# Altium footprint library PM254-1-10-Z-8.5.PcbLib: 1 footprints
Each footprint in its own frame and in the unit in brackets; x right, y up, seen from the top. Pads: shape width x height; smd on the part's side, far side on the other; paste and mask are expansions set on the pad; w line width, h text height; cw(c..) or ccw(c..) is an arc to the next point about the centre after c.
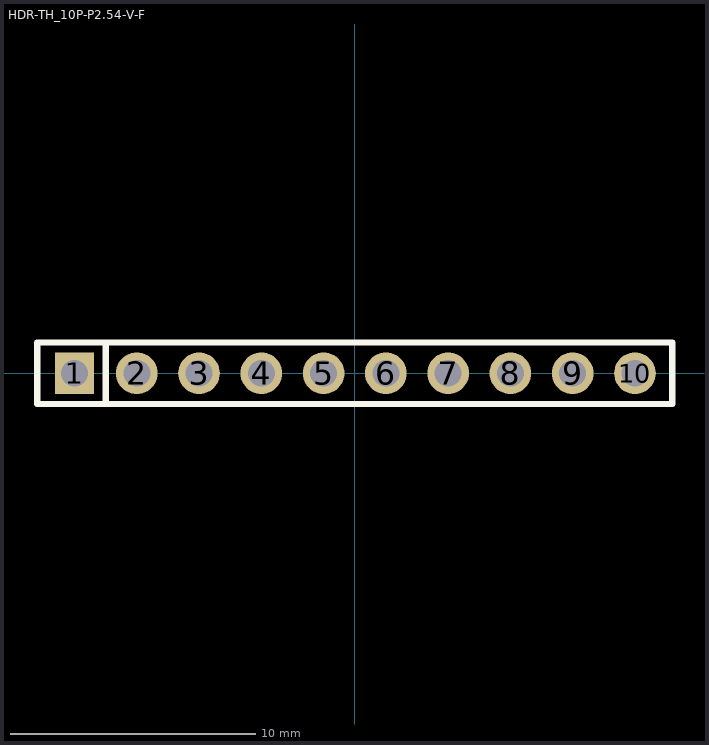
[diagram p0: the footprint, top view; thin cyan lines are the x and y axes]

## HDR-TH_10P-P2.54-V-F [mm]
pads (10):
  rect 1.575x1.7 hole 1.1: 1(-11.43,0)
  round 1.7 hole 1.1: 2(-8.89,0) 3(-6.35,0) 4(-3.81,0) 5(-1.27,0) 6(1.27,0) 7(3.81,0) 8(6.35,0) 9(8.89,0) 10(11.43,0)
Top Overlay:
  lines w0.254: -10.16,-1.25 -10.16,1.25 ; -12.95,-1.25 -12.95,1.25 12.95,1.25 12.95,-1.25 -12.95,-1.25
Mechanical 6:
  lines w0.051: -12.95,-1.25 12.95,-1.25 12.95,1.25 -12.95,1.25 -12.95,-1.25
Mechanical 8:
  region: -12.89,-1.25 -12.89,-1.255 -12.891,-1.264 -12.894,-1.273 -12.899,-1.281 -12.904,-1.289 -12.911,-1.296 -12.919,-1.301 -12.927,-1.306 -12.936,-1.309 -12.945,-1.31 -12.955,-1.31 -12.964,-1.309 -12.973,-1.306 -12.981,-1.301 -12.989,-1.296 -12.996,-1.289 -13.001,-1.281 -13.006,-1.273 -13.008,-1.264 -13.01,-1.255 -13.01,-1.25 -13.01,-1.245 -13.008,-1.236 -13.006,-1.227 -13.001,-1.219 -12.996,-1.211 -12.989,-1.204 -12.981,-1.199 -12.973,-1.194 -12.964,-1.191 -12.955,-1.19 -12.945,-1.19 -12.936,-1.191 -12.927,-1.194 -12.919,-1.199 -12.911,-1.204 -12.904,-1.211 -12.899,-1.219 -12.894,-1.227 -12.891,-1.236 -12.89,-1.245 -12.89,-1.25
Mechanical 9:
  region: 11.11,0.2 11.75,0.2 11.75,-0.2 11.11,-0.2
  region: 8.57,0.2 9.21,0.2 9.21,-0.2 8.57,-0.2
  region: 6.03,0.2 6.67,0.2 6.67,-0.2 6.03,-0.2
  region: 3.49,0.2 4.13,0.2 4.13,-0.2 3.49,-0.2
  region: 0.95,0.2 1.59,0.2 1.59,-0.2 0.95,-0.2
  region: -1.59,0.2 -0.95,0.2 -0.95,-0.2 -1.59,-0.2
  region: -4.13,0.2 -3.49,0.2 -3.49,-0.2 -4.13,-0.2
  region: -6.67,0.2 -6.03,0.2 -6.03,-0.2 -6.67,-0.2
  region: -9.21,0.2 -8.57,0.2 -8.57,-0.2 -9.21,-0.2
  region: -11.75,-0.2 -11.75,0.2 -11.11,0.2 -11.11,-0.2